# Altium schematic symbol library GRM155R61A475MEAAD.SchLib: 1 symbol
Pins are listed as number, name and electrical type; pins without a type are passive.

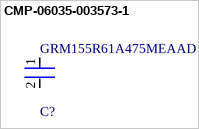
[diagram p0: symbol CMP-06035-003573-1]

## CMP-06035-003573-1
designator C?, comment GRM155R61A475MEAAD
Chip Multilayer Ceramic Capacitors for General Purpose, 0402, 4.7uF, X5R, 15%, 20%, 10V; Case/Package: 0402; Voltage Rating: 10V; Min Operating Temperature: -55°C; Mount: Surface Mount; Packaging: Tape and Reel; Max Operating Temperature: 85°C; Capacitance: 4.7uF; Case Code (Metric): 1005; Case Code (Imperial): 0402; Tolerance: 20%
footprint FP-GRM155-0_15-MFG
footprint FP-GRM155-0_15-IPC_A
footprint FP-GRM155-0_15-IPC_C
footprint FP-GRM155-0_15-IPC_B
pins: 1, 2